# EAGLE library part 6210XX21921_62102421921 (library WR-PHD)
WR-PHD 2.00 mm SMT Dual Pin Header Article Properties Pins 4 unitless; 6 unitless; 8 unitless; 10 unitless; 14 unitless; 16 unitless; 20 unitless; 24 unitless; 32 unitless; 44 unitless General Information Operating Temperature -40 °C up to +105 °C Compliance Lead free / RoHS Pitch 2 mm Durability 50 Cycles Rows Dual Gender Pin Header Type Straight Material Properties Insulator Material PA9T Insulator Flammability Rating UL94 V-0 Contact Material Copper Alloy Contact Plating Gold Contact Type Stamped Certification UL Approval E323964 Packaging Properties Packaging Tape and Reel with Cap; Tube Electrical Properties IR 2 A Withstanding Voltage 500 V (AC) Contact Resistance 20 mΩ RISO 1000 MΩ <https://www.we-online.com/components/media/o57941v209%20Family_WR-PHD_Dual_SMT_Pin_Header_621xxx21921.jpg> Details see: www.we-online.com/en/components/products/PHD_2_00_SMT_DUAL_PIN_HEADER_6210XX21921 <www.we-online.com/catalog/PHD_2_00_SMT_DUAL_PIN_HEADER_6210XX21921/?utm_source=eagle_model&utm_medium=description_link&utm_campaign=eisos_eagle> Updated by Ella 2024-01-31 2024 (C) Würth Elektronik
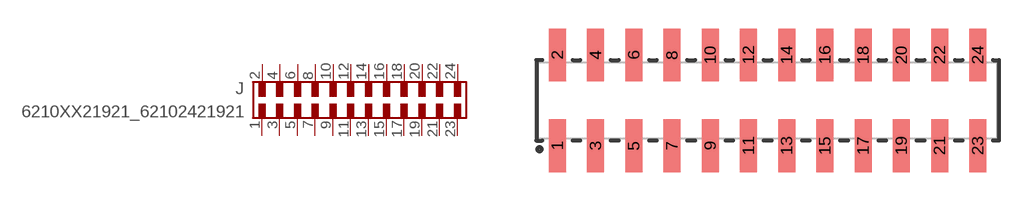
[diagram p309: symbol with the pads of 62102421921; footprint 62102421921]

Designator prefix J

## 6210XX21921_62102421921 (DATASHEET-URL: https://www.we-online.com/redexpert/spec/62102421921?ae; GENDER: Pin Header; IR: 2A; MOUNT: SMT; PACKAGING: Tube; PART-NUMBER: 62102421921; PINS: 24; PITCH: 2.00 mm; ROWS: Dual; TYPE: Straight; VALUE: 62102421921)  [62102421921]
1  1  pas
2  2  pas
3  3  pas
4  4  pas
5  5  pas
6  6  pas
7  7  pas
8  8  pas
9  9  pas
10  10  pas
11  11  pas
12  12  pas
13  13  pas
14  14  pas
15  15  pas
16  16  pas
17  17  pas
18  18  pas
19  19  pas
20  20  pas
21  21  pas
22  22  pas
23  23  pas
24  24  pas

## Footprint 62102421921 (pad centres in mm)
WR-PHD 2.00 mm SMT Dual Pin Header, 24 Pins
smd 0.89 x 2.75: 1 -11,-2.375; 2 -11,2.375; 3 -9,-2.375; 4 -9,2.375; 5 -7,-2.375; 6 -7,2.375; 7 -5,-2.375; 8 -5,2.375; 9 -3,-2.375; 10 -3,2.375; 11 -1,-2.375; 12 -1,2.375; 13 1,-2.375; 14 1,2.375; 15 3,-2.375; 16 3,2.375; 17 5,-2.375; 18 5,2.375; 19 7,-2.375; 20 7,2.375; 21 9,-2.375; 22 9,2.375; 23 11,-2.375; 24 11,2.375